# Altium schematic symbol library MY_LIB_Connectors_IEC.SchLib: 136 symbols (part 2 of 3)
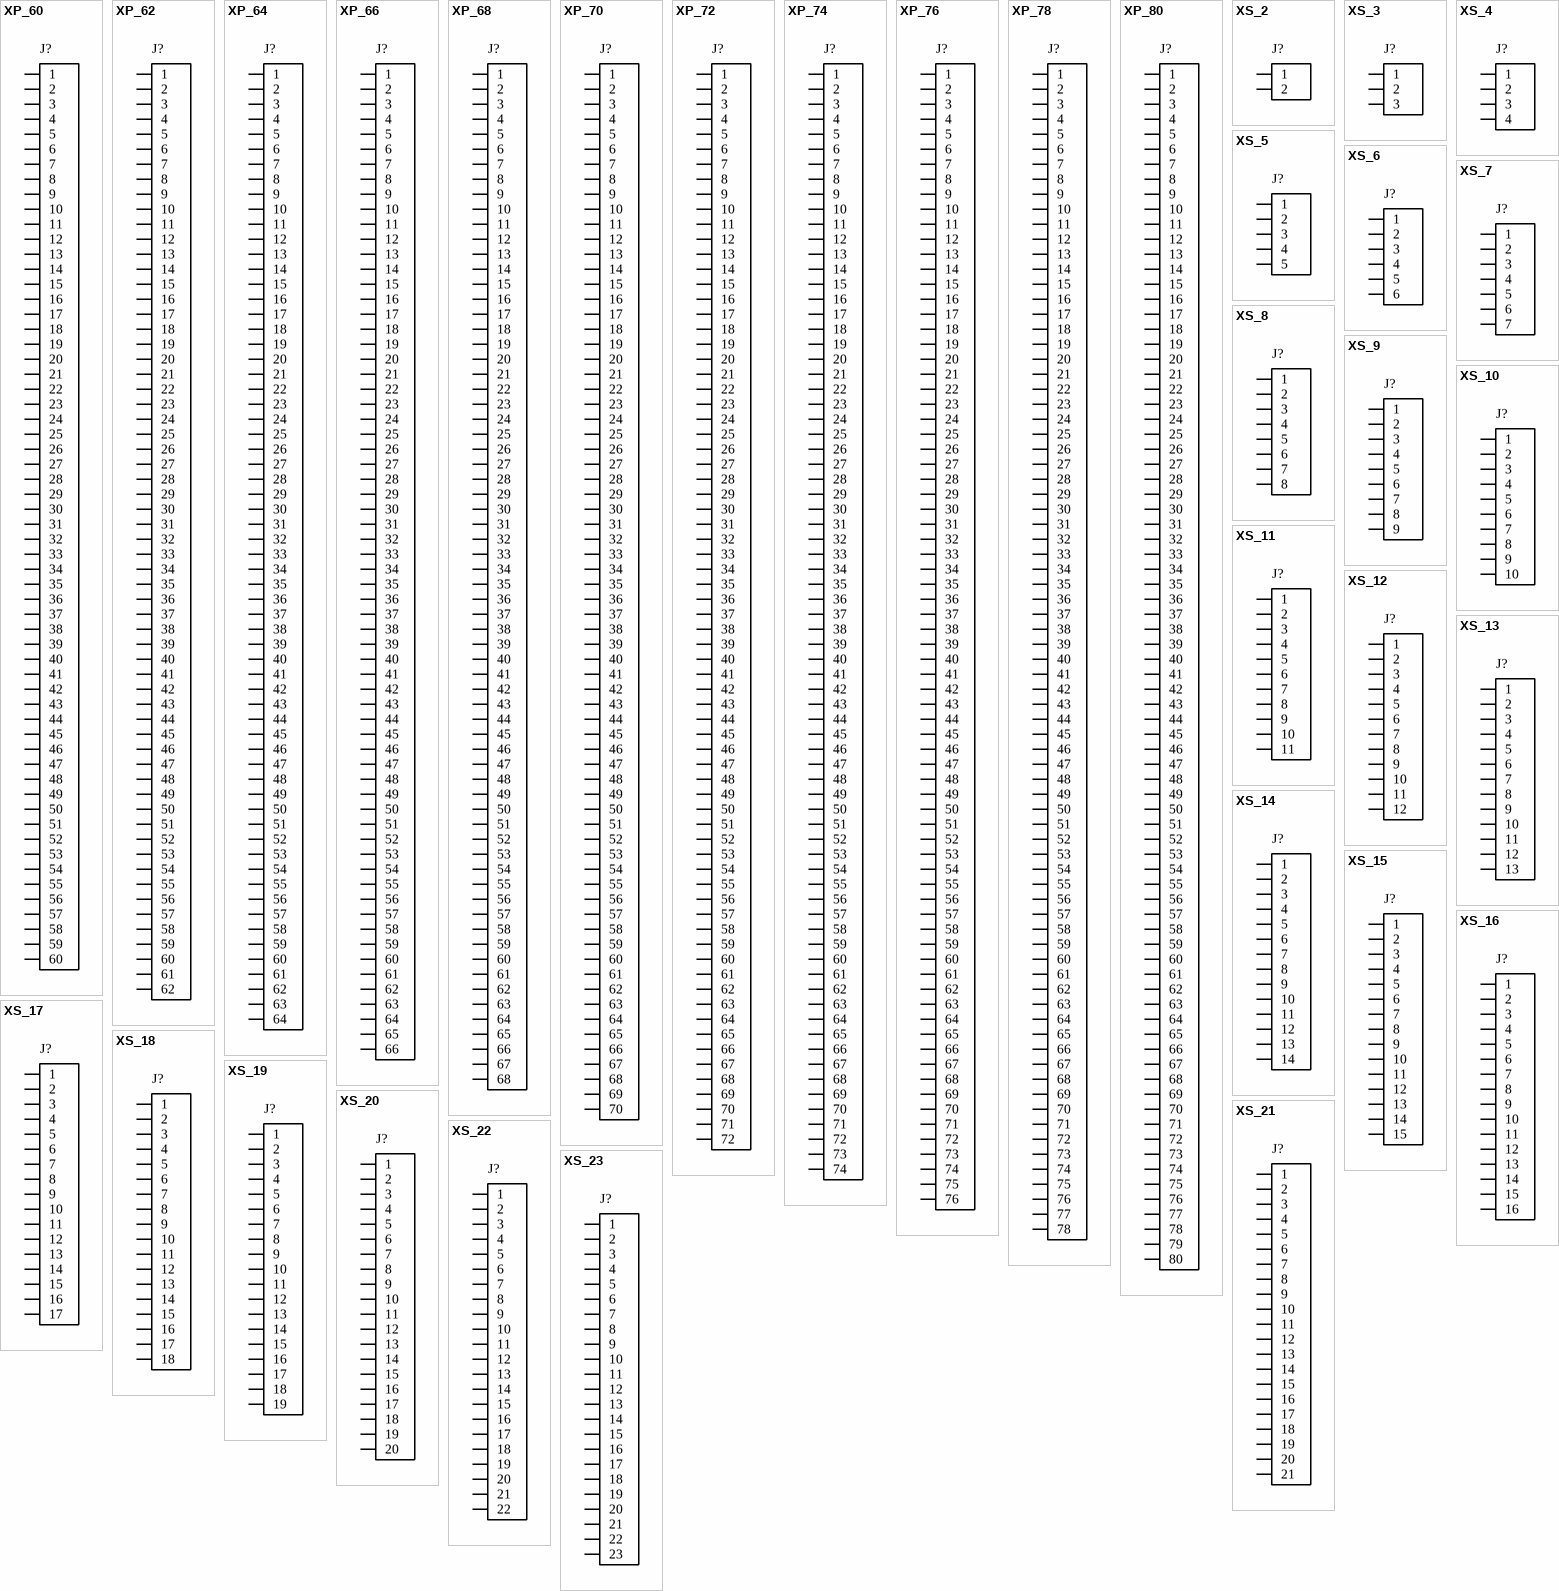
[diagram p5: symbols XP_60 to XS_23]

## XP_64
designator J?  (value not drawn)
Generic 64-contact connector; editable signal names; Pin64_Name: Name; Value: *; Pin63_Name: Name; Pin62_Name: Name; Pin61_Name: Name; Pin60_Name: Name; Pin59_Name: Name; Pin58_Name: Name; Pin57_Name: Name; Pin56_Name: Name; Pin55_Name: Name; Pin54_Name: Name; Pin53_Name: Name; Pin52_Name: Name; Pin51_Name: Name; Pin50_Name: Name; Pin49_Name: Name; Pin48_Name: Name; Pin47_Name: Name; Pin46_Name: Name; Pin45_Name: Name; Pin44_Name: Name; Pin43_Name: Name; Pin42_Name: Name; Pin41_Name: Name; Pin40_Name: Name; Pin39_Name: Name; Pin38_Name: Name; Pin37_Name: Name; Pin36_Name: Name; Pin35_Name: Name; Pin34_Name: Name; Pin33_Name: Name; Pin32_Name: Name; Pin31_Name: Name; Pin30_Name: Name; Pin29_Name: Name; Pin28_Name: Name; Pin27_Name: Name; Pin26_Name: Name; Pin25_Name: Name; Pin24_Name: Name; Pin23_Name: Name; Pin22_Name: Name; Pin21_Name: Name; Pin20_Name: Name; Pin19_Name: Name; Pin18_Name: Name; Pin17_Name: Name; Pin16_Name: Name; Pin15_Name: Name; Pin14_Name: Name; Pin13_Name: Name; Pin12_Name: Name; Pin11_Name: Name; Pin10_Name: Name; Pin9_Name: Name; Pin8_Name: Name; Pin7_Name: Name; Pin6_Name: Name; Pin5_Name: Name; Pin4_Name: Name; Pin3_Name: Name; Pin2_Name: Name; Pin1_Name: Name
pins: 1 Name, 2 Name, 3 Name, 4 Name, 5 Name, 6 Name, 7 Name, 8 Name, 9 Name, 10 Name, 11 Name, 12 Name, 13 Name, 14 Name, 15 Name, 16 Name, 17 Name, 18 Name, 19 Name, 20 Name, 21 Name, 22 Name, 23 Name, 24 Name, 25 Name, 26 Name, 27 Name, 28 Name, 29 Name, 30 Name, 31 Name, 32 Name, 33 Name, 34 Name, 35 Name, 36 Name, 37 Name, 38 Name, 39 Name, 40 Name, 41 Name, 42 Name, 43 Name, 44 Name, 45 Name, 46 Name, 47 Name, 48 Name, 49 Name, 50 Name, 51 Name, 52 Name, 53 Name, 54 Name, 55 Name, 56 Name, 57 Name, 58 Name, 59 Name, 60 Name, 61 Name, 62 Name, 63 Name, 64 Name

## XP_66
designator J?  (value not drawn)
Generic 66-contact connector; editable signal names; Pin66_Name: Name; Value: *; Pin65_Name: Name; Pin64_Name: Name; Pin63_Name: Name; Pin62_Name: Name; Pin61_Name: Name; Pin60_Name: Name; Pin59_Name: Name; Pin58_Name: Name; Pin57_Name: Name; Pin56_Name: Name; Pin55_Name: Name; Pin54_Name: Name; Pin53_Name: Name; Pin52_Name: Name; Pin51_Name: Name; Pin50_Name: Name; Pin49_Name: Name; Pin48_Name: Name; Pin47_Name: Name; Pin46_Name: Name; Pin45_Name: Name; Pin44_Name: Name; Pin43_Name: Name; Pin42_Name: Name; Pin41_Name: Name; Pin40_Name: Name; Pin39_Name: Name; Pin38_Name: Name; Pin37_Name: Name; Pin36_Name: Name; Pin35_Name: Name; Pin34_Name: Name; Pin33_Name: Name; Pin32_Name: Name; Pin31_Name: Name; Pin30_Name: Name; Pin29_Name: Name; Pin28_Name: Name; Pin27_Name: Name; Pin26_Name: Name; Pin25_Name: Name; Pin24_Name: Name; Pin23_Name: Name; Pin22_Name: Name; Pin21_Name: Name; Pin20_Name: Name; Pin19_Name: Name; Pin18_Name: Name; Pin17_Name: Name; Pin16_Name: Name; Pin15_Name: Name; Pin14_Name: Name; Pin13_Name: Name; Pin12_Name: Name; Pin11_Name: Name; Pin10_Name: Name; Pin9_Name: Name; Pin8_Name: Name; Pin7_Name: Name; Pin6_Name: Name; Pin5_Name: Name; Pin4_Name: Name; Pin3_Name: Name; Pin2_Name: Name; Pin1_Name: Name
pins: 1 Name, 2 Name, 3 Name, 4 Name, 5 Name, 6 Name, 7 Name, 8 Name, 9 Name, 10 Name, 11 Name, 12 Name, 13 Name, 14 Name, 15 Name, 16 Name, 17 Name, 18 Name, 19 Name, 20 Name, 21 Name, 22 Name, 23 Name, 24 Name, 25 Name, 26 Name, 27 Name, 28 Name, 29 Name, 30 Name, 31 Name, 32 Name, 33 Name, 34 Name, 35 Name, 36 Name, 37 Name, 38 Name, 39 Name, 40 Name, 41 Name, 42 Name, 43 Name, 44 Name, 45 Name, 46 Name, 47 Name, 48 Name, 49 Name, 50 Name, 51 Name, 52 Name, 53 Name, 54 Name, 55 Name, 56 Name, 57 Name, 58 Name, 59 Name, 60 Name, 61 Name, 62 Name, 63 Name, 64 Name, 65 Name, 66 Name

## XP_68
designator J?  (value not drawn)
Generic 68-contact connector; editable signal names; Pin68_Name: Name; Value: *; Pin67_Name: Name; Pin66_Name: Name; Pin65_Name: Name; Pin64_Name: Name; Pin63_Name: Name; Pin62_Name: Name; Pin61_Name: Name; Pin60_Name: Name; Pin59_Name: Name; Pin58_Name: Name; Pin57_Name: Name; Pin56_Name: Name; Pin55_Name: Name; Pin54_Name: Name; Pin53_Name: Name; Pin52_Name: Name; Pin51_Name: Name; Pin50_Name: Name; Pin49_Name: Name; Pin48_Name: Name; Pin47_Name: Name; Pin46_Name: Name; Pin45_Name: Name; Pin44_Name: Name; Pin43_Name: Name; Pin42_Name: Name; Pin41_Name: Name; Pin40_Name: Name; Pin39_Name: Name; Pin38_Name: Name; Pin37_Name: Name; Pin36_Name: Name; Pin35_Name: Name; Pin34_Name: Name; Pin33_Name: Name; Pin32_Name: Name; Pin31_Name: Name; Pin30_Name: Name; Pin29_Name: Name; Pin28_Name: Name; Pin27_Name: Name; Pin26_Name: Name; Pin25_Name: Name; Pin24_Name: Name; Pin23_Name: Name; Pin22_Name: Name; Pin21_Name: Name; Pin20_Name: Name; Pin19_Name: Name; Pin18_Name: Name; Pin17_Name: Name; Pin16_Name: Name; Pin15_Name: Name; Pin14_Name: Name; Pin13_Name: Name; Pin12_Name: Name; Pin11_Name: Name; Pin10_Name: Name; Pin9_Name: Name; Pin8_Name: Name; Pin7_Name: Name; Pin6_Name: Name; Pin5_Name: Name; Pin4_Name: Name; Pin3_Name: Name; Pin2_Name: Name; Pin1_Name: Name
pins: 1 Name, 2 Name, 3 Name, 4 Name, 5 Name, 6 Name, 7 Name, 8 Name, 9 Name, 10 Name, 11 Name, 12 Name, 13 Name, 14 Name, 15 Name, 16 Name, 17 Name, 18 Name, 19 Name, 20 Name, 21 Name, 22 Name, 23 Name, 24 Name, 25 Name, 26 Name, 27 Name, 28 Name, 29 Name, 30 Name, 31 Name, 32 Name, 33 Name, 34 Name, 35 Name, 36 Name, 37 Name, 38 Name, 39 Name, 40 Name, 41 Name, 42 Name, 43 Name, 44 Name, 45 Name, 46 Name, 47 Name, 48 Name, 49 Name, 50 Name, 51 Name, 52 Name, 53 Name, 54 Name, 55 Name, 56 Name, 57 Name, 58 Name, 59 Name, 60 Name, 61 Name, 62 Name, 63 Name, 64 Name, 65 Name, 66 Name, 67 Name, 68 Name

## XP_70
designator J?  (value not drawn)
Generic 70-contact connector; editable signal names; Pin70_Name: Name; Value: *; Pin69_Name: Name; Pin68_Name: Name; Pin67_Name: Name; Pin66_Name: Name; Pin65_Name: Name; Pin64_Name: Name; Pin63_Name: Name; Pin62_Name: Name; Pin61_Name: Name; Pin60_Name: Name; Pin59_Name: Name; Pin58_Name: Name; Pin57_Name: Name; Pin56_Name: Name; Pin55_Name: Name; Pin54_Name: Name; Pin53_Name: Name; Pin52_Name: Name; Pin51_Name: Name; Pin50_Name: Name; Pin49_Name: Name; Pin48_Name: Name; Pin47_Name: Name; Pin46_Name: Name; Pin45_Name: Name; Pin44_Name: Name; Pin43_Name: Name; Pin42_Name: Name; Pin41_Name: Name; Pin40_Name: Name; Pin39_Name: Name; Pin38_Name: Name; Pin37_Name: Name; Pin36_Name: Name; Pin35_Name: Name; Pin34_Name: Name; Pin33_Name: Name; Pin32_Name: Name; Pin31_Name: Name; Pin30_Name: Name; Pin29_Name: Name; Pin28_Name: Name; Pin27_Name: Name; Pin26_Name: Name; Pin25_Name: Name; Pin24_Name: Name; Pin23_Name: Name; Pin22_Name: Name; Pin21_Name: Name; Pin20_Name: Name; Pin19_Name: Name; Pin18_Name: Name; Pin17_Name: Name; Pin16_Name: Name; Pin15_Name: Name; Pin14_Name: Name; Pin13_Name: Name; Pin12_Name: Name; Pin11_Name: Name; Pin10_Name: Name; Pin9_Name: Name; Pin8_Name: Name; Pin7_Name: Name; Pin6_Name: Name; Pin5_Name: Name; Pin4_Name: Name; Pin3_Name: Name; Pin2_Name: Name; Pin1_Name: Name
pins: 1 Name, 2 Name, 3 Name, 4 Name, 5 Name, 6 Name, 7 Name, 8 Name, 9 Name, 10 Name, 11 Name, 12 Name, 13 Name, 14 Name, 15 Name, 16 Name, 17 Name, 18 Name, 19 Name, 20 Name, 21 Name, 22 Name, 23 Name, 24 Name, 25 Name, 26 Name, 27 Name, 28 Name, 29 Name, 30 Name, 31 Name, 32 Name, 33 Name, 34 Name, 35 Name, 36 Name, 37 Name, 38 Name, 39 Name, 40 Name, 41 Name, 42 Name, 43 Name, 44 Name, 45 Name, 46 Name, 47 Name, 48 Name, 49 Name, 50 Name, 51 Name, 52 Name, 53 Name, 54 Name, 55 Name, 56 Name, 57 Name, 58 Name, 59 Name, 60 Name, 61 Name, 62 Name, 63 Name, 64 Name, 65 Name, 66 Name, 67 Name, 68 Name, 69 Name, 70 Name

## XP_72
designator J?  (value not drawn)
Generic 72-contact connector; editable signal names; Pin72_Name: Name; Value: *; Pin71_Name: Name; Pin70_Name: Name; Pin69_Name: Name; Pin68_Name: Name; Pin67_Name: Name; Pin66_Name: Name; Pin65_Name: Name; Pin64_Name: Name; Pin63_Name: Name; Pin62_Name: Name; Pin61_Name: Name; Pin60_Name: Name; Pin59_Name: Name; Pin58_Name: Name; Pin57_Name: Name; Pin56_Name: Name; Pin55_Name: Name; Pin54_Name: Name; Pin53_Name: Name; Pin52_Name: Name; Pin51_Name: Name; Pin50_Name: Name; Pin49_Name: Name; Pin48_Name: Name; Pin47_Name: Name; Pin46_Name: Name; Pin45_Name: Name; Pin44_Name: Name; Pin43_Name: Name; Pin42_Name: Name; Pin41_Name: Name; Pin40_Name: Name; Pin39_Name: Name; Pin38_Name: Name; Pin37_Name: Name; Pin36_Name: Name; Pin35_Name: Name; Pin34_Name: Name; Pin33_Name: Name; Pin32_Name: Name; Pin31_Name: Name; Pin30_Name: Name; Pin29_Name: Name; Pin28_Name: Name; Pin27_Name: Name; Pin26_Name: Name; Pin25_Name: Name; Pin24_Name: Name; Pin23_Name: Name; Pin22_Name: Name; Pin21_Name: Name; Pin20_Name: Name; Pin19_Name: Name; Pin18_Name: Name; Pin17_Name: Name; Pin16_Name: Name; Pin15_Name: Name; Pin14_Name: Name; Pin13_Name: Name; Pin12_Name: Name; Pin11_Name: Name; Pin10_Name: Name; Pin9_Name: Name; Pin8_Name: Name; Pin7_Name: Name; Pin6_Name: Name; Pin5_Name: Name; Pin4_Name: Name; Pin3_Name: Name; Pin2_Name: Name; Pin1_Name: Name
pins: 1 Name, 2 Name, 3 Name, 4 Name, 5 Name, 6 Name, 7 Name, 8 Name, 9 Name, 10 Name, 11 Name, 12 Name, 13 Name, 14 Name, 15 Name, 16 Name, 17 Name, 18 Name, 19 Name, 20 Name, 21 Name, 22 Name, 23 Name, 24 Name, 25 Name, 26 Name, 27 Name, 28 Name, 29 Name, 30 Name, 31 Name, 32 Name, 33 Name, 34 Name, 35 Name, 36 Name, 37 Name, 38 Name, 39 Name, 40 Name, 41 Name, 42 Name, 43 Name, 44 Name, 45 Name, 46 Name, 47 Name, 48 Name, 49 Name, 50 Name, 51 Name, 52 Name, 53 Name, 54 Name, 55 Name, 56 Name, 57 Name, 58 Name, 59 Name, 60 Name, 61 Name, 62 Name, 63 Name, 64 Name, 65 Name, 66 Name, 67 Name, 68 Name, 69 Name, 70 Name, 71 Name, 72 Name

## XP_74
designator J?  (value not drawn)
Generic 74-contact connector; editable signal names; Pin74_Name: Name; Value: *; Pin73_Name: Name; Pin72_Name: Name; Pin71_Name: Name; Pin70_Name: Name; Pin69_Name: Name; Pin68_Name: Name; Pin67_Name: Name; Pin66_Name: Name; Pin65_Name: Name; Pin64_Name: Name; Pin63_Name: Name; Pin62_Name: Name; Pin61_Name: Name; Pin60_Name: Name; Pin59_Name: Name; Pin58_Name: Name; Pin57_Name: Name; Pin56_Name: Name; Pin55_Name: Name; Pin54_Name: Name; Pin53_Name: Name; Pin52_Name: Name; Pin51_Name: Name; Pin50_Name: Name; Pin49_Name: Name; Pin48_Name: Name; Pin47_Name: Name; Pin46_Name: Name; Pin45_Name: Name; Pin44_Name: Name; Pin43_Name: Name; Pin42_Name: Name; Pin41_Name: Name; Pin40_Name: Name; Pin39_Name: Name; Pin38_Name: Name; Pin37_Name: Name; Pin36_Name: Name; Pin35_Name: Name; Pin34_Name: Name; Pin33_Name: Name; Pin32_Name: Name; Pin31_Name: Name; Pin30_Name: Name; Pin29_Name: Name; Pin28_Name: Name; Pin27_Name: Name; Pin26_Name: Name; Pin25_Name: Name; Pin24_Name: Name; Pin23_Name: Name; Pin22_Name: Name; Pin21_Name: Name; Pin20_Name: Name; Pin19_Name: Name; Pin18_Name: Name; Pin17_Name: Name; Pin16_Name: Name; Pin15_Name: Name; Pin14_Name: Name; Pin13_Name: Name; Pin12_Name: Name; Pin11_Name: Name; Pin10_Name: Name; Pin9_Name: Name; Pin8_Name: Name; Pin7_Name: Name; Pin6_Name: Name; Pin5_Name: Name; Pin4_Name: Name; Pin3_Name: Name; Pin2_Name: Name; Pin1_Name: Name
pins: 1 Name, 2 Name, 3 Name, 4 Name, 5 Name, 6 Name, 7 Name, 8 Name, 9 Name, 10 Name, 11 Name, 12 Name, 13 Name, 14 Name, 15 Name, 16 Name, 17 Name, 18 Name, 19 Name, 20 Name, 21 Name, 22 Name, 23 Name, 24 Name, 25 Name, 26 Name, 27 Name, 28 Name, 29 Name, 30 Name, 31 Name, 32 Name, 33 Name, 34 Name, 35 Name, 36 Name, 37 Name, 38 Name, 39 Name, 40 Name, 41 Name, 42 Name, 43 Name, 44 Name, 45 Name, 46 Name, 47 Name, 48 Name, 49 Name, 50 Name, 51 Name, 52 Name, 53 Name, 54 Name, 55 Name, 56 Name, 57 Name, 58 Name, 59 Name, 60 Name, 61 Name, 62 Name, 63 Name, 64 Name, 65 Name, 66 Name, 67 Name, 68 Name, 69 Name, 70 Name, 71 Name, 72 Name, 73 Name, 74 Name

## XP_76
designator J?  (value not drawn)
Generic 76-contact connector; editable signal names; Pin76_Name: Name; Value: *; Pin75_Name: Name; Pin74_Name: Name; Pin73_Name: Name; Pin72_Name: Name; Pin71_Name: Name; Pin70_Name: Name; Pin69_Name: Name; Pin68_Name: Name; Pin67_Name: Name; Pin66_Name: Name; Pin65_Name: Name; Pin64_Name: Name; Pin63_Name: Name; Pin62_Name: Name; Pin61_Name: Name; Pin60_Name: Name; Pin59_Name: Name; Pin58_Name: Name; Pin57_Name: Name; Pin56_Name: Name; Pin55_Name: Name; Pin54_Name: Name; Pin53_Name: Name; Pin52_Name: Name; Pin51_Name: Name; Pin50_Name: Name; Pin49_Name: Name; Pin48_Name: Name; Pin47_Name: Name; Pin46_Name: Name; Pin45_Name: Name; Pin44_Name: Name; Pin43_Name: Name; Pin42_Name: Name; Pin41_Name: Name; Pin40_Name: Name; Pin39_Name: Name; Pin38_Name: Name; Pin37_Name: Name; Pin36_Name: Name; Pin35_Name: Name; Pin34_Name: Name; Pin33_Name: Name; Pin32_Name: Name; Pin31_Name: Name; Pin30_Name: Name; Pin29_Name: Name; Pin28_Name: Name; Pin27_Name: Name; Pin26_Name: Name; Pin25_Name: Name; Pin24_Name: Name; Pin23_Name: Name; Pin22_Name: Name; Pin21_Name: Name; Pin20_Name: Name; Pin19_Name: Name; Pin18_Name: Name; Pin17_Name: Name; Pin16_Name: Name; Pin15_Name: Name; Pin14_Name: Name; Pin13_Name: Name; Pin12_Name: Name; Pin11_Name: Name; Pin10_Name: Name; Pin9_Name: Name; Pin8_Name: Name; Pin7_Name: Name; Pin6_Name: Name; Pin5_Name: Name; Pin4_Name: Name; Pin3_Name: Name; Pin2_Name: Name; Pin1_Name: Name
pins: 1 Name, 2 Name, 3 Name, 4 Name, 5 Name, 6 Name, 7 Name, 8 Name, 9 Name, 10 Name, 11 Name, 12 Name, 13 Name, 14 Name, 15 Name, 16 Name, 17 Name, 18 Name, 19 Name, 20 Name, 21 Name, 22 Name, 23 Name, 24 Name, 25 Name, 26 Name, 27 Name, 28 Name, 29 Name, 30 Name, 31 Name, 32 Name, 33 Name, 34 Name, 35 Name, 36 Name, 37 Name, 38 Name, 39 Name, 40 Name, 41 Name, 42 Name, 43 Name, 44 Name, 45 Name, 46 Name, 47 Name, 48 Name, 49 Name, 50 Name, 51 Name, 52 Name, 53 Name, 54 Name, 55 Name, 56 Name, 57 Name, 58 Name, 59 Name, 60 Name, 61 Name, 62 Name, 63 Name, 64 Name, 65 Name, 66 Name, 67 Name, 68 Name, 69 Name, 70 Name, 71 Name, 72 Name, 73 Name, 74 Name, 75 Name, 76 Name

## XP_78
designator J?  (value not drawn)
Generic 78-contact connector; editable signal names; Pin78_Name: Name; Value: *; Pin77_Name: Name; Pin76_Name: Name; Pin75_Name: Name; Pin74_Name: Name; Pin73_Name: Name; Pin72_Name: Name; Pin71_Name: Name; Pin70_Name: Name; Pin69_Name: Name; Pin68_Name: Name; Pin67_Name: Name; Pin66_Name: Name; Pin65_Name: Name; Pin64_Name: Name; Pin63_Name: Name; Pin62_Name: Name; Pin61_Name: Name; Pin60_Name: Name; Pin59_Name: Name; Pin58_Name: Name; Pin57_Name: Name; Pin56_Name: Name; Pin55_Name: Name; Pin54_Name: Name; Pin53_Name: Name; Pin52_Name: Name; Pin51_Name: Name; Pin50_Name: Name; Pin49_Name: Name; Pin48_Name: Name; Pin47_Name: Name; Pin46_Name: Name; Pin45_Name: Name; Pin44_Name: Name; Pin43_Name: Name; Pin42_Name: Name; Pin41_Name: Name; Pin40_Name: Name; Pin39_Name: Name; Pin38_Name: Name; Pin37_Name: Name; Pin36_Name: Name; Pin35_Name: Name; Pin34_Name: Name; Pin33_Name: Name; Pin32_Name: Name; Pin31_Name: Name; Pin30_Name: Name; Pin29_Name: Name; Pin28_Name: Name; Pin27_Name: Name; Pin26_Name: Name; Pin25_Name: Name; Pin24_Name: Name; Pin23_Name: Name; Pin22_Name: Name; Pin21_Name: Name; Pin20_Name: Name; Pin19_Name: Name; Pin18_Name: Name; Pin17_Name: Name; Pin16_Name: Name; Pin15_Name: Name; Pin14_Name: Name; Pin13_Name: Name; Pin12_Name: Name; Pin11_Name: Name; Pin10_Name: Name; Pin9_Name: Name; Pin8_Name: Name; Pin7_Name: Name; Pin6_Name: Name; Pin5_Name: Name; Pin4_Name: Name; Pin3_Name: Name; Pin2_Name: Name; Pin1_Name: Name
pins: 1 Name, 2 Name, 3 Name, 4 Name, 5 Name, 6 Name, 7 Name, 8 Name, 9 Name, 10 Name, 11 Name, 12 Name, 13 Name, 14 Name, 15 Name, 16 Name, 17 Name, 18 Name, 19 Name, 20 Name, 21 Name, 22 Name, 23 Name, 24 Name, 25 Name, 26 Name, 27 Name, 28 Name, 29 Name, 30 Name, 31 Name, 32 Name, 33 Name, 34 Name, 35 Name, 36 Name, 37 Name, 38 Name, 39 Name, 40 Name, 41 Name, 42 Name, 43 Name, 44 Name, 45 Name, 46 Name, 47 Name, 48 Name, 49 Name, 50 Name, 51 Name, 52 Name, 53 Name, 54 Name, 55 Name, 56 Name, 57 Name, 58 Name, 59 Name, 60 Name, 61 Name, 62 Name, 63 Name, 64 Name, 65 Name, 66 Name, 67 Name, 68 Name, 69 Name, 70 Name, 71 Name, 72 Name, 73 Name, 74 Name, 75 Name, 76 Name, 77 Name, 78 Name

## XP_80
designator J?  (value not drawn)
Generic 80-contact connector; editable signal names; Pin80_Name: Name; Value: *; Pin79_Name: Name; Pin78_Name: Name; Pin77_Name: Name; Pin76_Name: Name; Pin75_Name: Name; Pin74_Name: Name; Pin73_Name: Name; Pin72_Name: Name; Pin71_Name: Name; Pin70_Name: Name; Pin69_Name: Name; Pin68_Name: Name; Pin67_Name: Name; Pin66_Name: Name; Pin65_Name: Name; Pin64_Name: Name; Pin63_Name: Name; Pin62_Name: Name; Pin61_Name: Name; Pin60_Name: Name; Pin59_Name: Name; Pin58_Name: Name; Pin57_Name: Name; Pin56_Name: Name; Pin55_Name: Name; Pin54_Name: Name; Pin53_Name: Name; Pin52_Name: Name; Pin51_Name: Name; Pin50_Name: Name; Pin49_Name: Name; Pin48_Name: Name; Pin47_Name: Name; Pin46_Name: Name; Pin45_Name: Name; Pin44_Name: Name; Pin43_Name: Name; Pin42_Name: Name; Pin41_Name: Name; Pin40_Name: Name; Pin39_Name: Name; Pin38_Name: Name; Pin37_Name: Name; Pin36_Name: Name; Pin35_Name: Name; Pin34_Name: Name; Pin33_Name: Name; Pin32_Name: Name; Pin31_Name: Name; Pin30_Name: Name; Pin29_Name: Name; Pin28_Name: Name; Pin27_Name: Name; Pin26_Name: Name; Pin25_Name: Name; Pin24_Name: Name; Pin23_Name: Name; Pin22_Name: Name; Pin21_Name: Name; Pin20_Name: Name; Pin19_Name: Name; Pin18_Name: Name; Pin17_Name: Name; Pin16_Name: Name; Pin15_Name: Name; Pin14_Name: Name; Pin13_Name: Name; Pin12_Name: Name; Pin11_Name: Name; Pin10_Name: Name; Pin9_Name: Name; Pin8_Name: Name; Pin7_Name: Name; Pin6_Name: Name; Pin5_Name: Name; Pin4_Name: Name; Pin3_Name: Name; Pin2_Name: Name; Pin1_Name: Name
pins: 1 Name, 2 Name, 3 Name, 4 Name, 5 Name, 6 Name, 7 Name, 8 Name, 9 Name, 10 Name, 11 Name, 12 Name, 13 Name, 14 Name, 15 Name, 16 Name, 17 Name, 18 Name, 19 Name, 20 Name, 21 Name, 22 Name, 23 Name, 24 Name, 25 Name, 26 Name, 27 Name, 28 Name, 29 Name, 30 Name, 31 Name, 32 Name, 33 Name, 34 Name, 35 Name, 36 Name, 37 Name, 38 Name, 39 Name, 40 Name, 41 Name, 42 Name, 43 Name, 44 Name, 45 Name, 46 Name, 47 Name, 48 Name, 49 Name, 50 Name, 51 Name, 52 Name, 53 Name, 54 Name, 55 Name, 56 Name, 57 Name, 58 Name, 59 Name, 60 Name, 61 Name, 62 Name, 63 Name, 64 Name, 65 Name, 66 Name, 67 Name, 68 Name, 69 Name, 70 Name, 71 Name, 72 Name, 73 Name, 74 Name, 75 Name, 76 Name, 77 Name, 78 Name, 79 Name, 80 Name

## XS_2
designator J?  (value not drawn)
Generic 2-contact connector; editable signal names; Pin2_Name: Name; Value: *; Pin1_Name: Name
pins: 1 Name, 2 Name

## XS_3
designator J?  (value not drawn)
Generic 3-contact connector; editable signal names; Pin3_Name: Name; Value: *; Pin2_Name: Name; Pin1_Name: Name
pins: 1 Name, 2 Name, 3 Name

## XS_4
designator J?  (value not drawn)
Generic 4-contact connector; editable signal names; Pin4_Name: Name; Value: *; Pin3_Name: Name; Pin2_Name: Name; Pin1_Name: Name
pins: 1 Name, 2 Name, 3 Name, 4 Name

## XS_5
designator J?  (value not drawn)
Generic 5-contact connector; editable signal names; Pin5_Name: Name; Value: *; Pin4_Name: Name; Pin3_Name: Name; Pin2_Name: Name; Pin1_Name: Name
pins: 1 Name, 2 Name, 3 Name, 4 Name, 5 Name

## XS_6
designator J?  (value not drawn)
Generic 6-contact connector; editable signal names; Pin6_Name: Name; Value: *; Pin5_Name: Name; Pin4_Name: Name; Pin3_Name: Name; Pin2_Name: Name; Pin1_Name: Name
pins: 1 Name, 2 Name, 3 Name, 4 Name, 5 Name, 6 Name

## XS_7
designator J?  (value not drawn)
Generic 7-contact connector; editable signal names; Pin7_Name: Name; Value: *; Pin6_Name: Name; Pin5_Name: Name; Pin4_Name: Name; Pin3_Name: Name; Pin2_Name: Name; Pin1_Name: Name
pins: 1 Name, 2 Name, 3 Name, 4 Name, 5 Name, 6 Name, 7 Name

## XS_8
designator J?  (value not drawn)
Generic 8-contact connector; editable signal names; Pin8_Name: Name; Value: *; Pin7_Name: Name; Pin6_Name: Name; Pin5_Name: Name; Pin4_Name: Name; Pin3_Name: Name; Pin2_Name: Name; Pin1_Name: Name
pins: 1 Name, 2 Name, 3 Name, 4 Name, 5 Name, 6 Name, 7 Name, 8 Name

## XS_9
designator J?  (value not drawn)
Generic 9-contact connector; editable signal names; Pin9_Name: Name; Value: *; Pin8_Name: Name; Pin7_Name: Name; Pin6_Name: Name; Pin5_Name: Name; Pin4_Name: Name; Pin3_Name: Name; Pin2_Name: Name; Pin1_Name: Name
pins: 1 Name, 2 Name, 3 Name, 4 Name, 5 Name, 6 Name, 7 Name, 8 Name, 9 Name

## XS_10
designator J?  (value not drawn)
Generic 10-contact connector; editable signal names; Pin10_Name: Name; Value: *; Pin9_Name: Name; Pin8_Name: Name; Pin7_Name: Name; Pin6_Name: Name; Pin5_Name: Name; Pin4_Name: Name; Pin3_Name: Name; Pin2_Name: Name; Pin1_Name: Name
pins: 1 Name, 2 Name, 3 Name, 4 Name, 5 Name, 6 Name, 7 Name, 8 Name, 9 Name, 10 Name

## XS_11
designator J?  (value not drawn)
Generic 11-contact connector; editable signal names; Pin11_Name: Name; Value: *; Pin10_Name: Name; Pin9_Name: Name; Pin8_Name: Name; Pin7_Name: Name; Pin6_Name: Name; Pin5_Name: Name; Pin4_Name: Name; Pin3_Name: Name; Pin2_Name: Name; Pin1_Name: Name
pins: 1 Name, 2 Name, 3 Name, 4 Name, 5 Name, 6 Name, 7 Name, 8 Name, 9 Name, 10 Name, 11 Name

## XS_12
designator J?  (value not drawn)
Generic 12-contact connector; editable signal names; Pin12_Name: Name; Value: *; Pin11_Name: Name; Pin10_Name: Name; Pin9_Name: Name; Pin8_Name: Name; Pin7_Name: Name; Pin6_Name: Name; Pin5_Name: Name; Pin4_Name: Name; Pin3_Name: Name; Pin2_Name: Name; Pin1_Name: Name
pins: 1 Name, 2 Name, 3 Name, 4 Name, 5 Name, 6 Name, 7 Name, 8 Name, 9 Name, 10 Name, 11 Name, 12 Name

## XS_13
designator J?  (value not drawn)
Generic 13-contact connector; editable signal names; Pin13_Name: Name; Value: *; Pin12_Name: Name; Pin11_Name: Name; Pin10_Name: Name; Pin9_Name: Name; Pin8_Name: Name; Pin7_Name: Name; Pin6_Name: Name; Pin5_Name: Name; Pin4_Name: Name; Pin3_Name: Name; Pin2_Name: Name; Pin1_Name: Name
pins: 1 Name, 2 Name, 3 Name, 4 Name, 5 Name, 6 Name, 7 Name, 8 Name, 9 Name, 10 Name, 11 Name, 12 Name, 13 Name

## XS_14
designator J?  (value not drawn)
Generic 14-contact connector; editable signal names; Pin14_Name: Name; Value: *; Pin13_Name: Name; Pin12_Name: Name; Pin11_Name: Name; Pin10_Name: Name; Pin9_Name: Name; Pin8_Name: Name; Pin7_Name: Name; Pin6_Name: Name; Pin5_Name: Name; Pin4_Name: Name; Pin3_Name: Name; Pin2_Name: Name; Pin1_Name: Name
pins: 1 Name, 2 Name, 3 Name, 4 Name, 5 Name, 6 Name, 7 Name, 8 Name, 9 Name, 10 Name, 11 Name, 12 Name, 13 Name, 14 Name

## XS_15
designator J?  (value not drawn)
Generic 15-contact connector; editable signal names; Pin15_Name: Name; Value: *; Pin14_Name: Name; Pin13_Name: Name; Pin12_Name: Name; Pin11_Name: Name; Pin10_Name: Name; Pin9_Name: Name; Pin8_Name: Name; Pin7_Name: Name; Pin6_Name: Name; Pin5_Name: Name; Pin4_Name: Name; Pin3_Name: Name; Pin2_Name: Name; Pin1_Name: Name
pins: 1 Name, 2 Name, 3 Name, 4 Name, 5 Name, 6 Name, 7 Name, 8 Name, 9 Name, 10 Name, 11 Name, 12 Name, 13 Name, 14 Name, 15 Name

## XS_16
designator J?  (value not drawn)
Generic 16-contact connector; editable signal names; Pin16_Name: Name; Value: *; Pin15_Name: Name; Pin14_Name: Name; Pin13_Name: Name; Pin12_Name: Name; Pin11_Name: Name; Pin10_Name: Name; Pin9_Name: Name; Pin8_Name: Name; Pin7_Name: Name; Pin6_Name: Name; Pin5_Name: Name; Pin4_Name: Name; Pin3_Name: Name; Pin2_Name: Name; Pin1_Name: Name
pins: 1 Name, 2 Name, 3 Name, 4 Name, 5 Name, 6 Name, 7 Name, 8 Name, 9 Name, 10 Name, 11 Name, 12 Name, 13 Name, 14 Name, 15 Name, 16 Name

## XS_17
designator J?  (value not drawn)
Generic 17-contact connector; editable signal names; Pin17_Name: Name; Value: *; Pin16_Name: Name; Pin15_Name: Name; Pin14_Name: Name; Pin13_Name: Name; Pin12_Name: Name; Pin11_Name: Name; Pin10_Name: Name; Pin9_Name: Name; Pin8_Name: Name; Pin7_Name: Name; Pin6_Name: Name; Pin5_Name: Name; Pin4_Name: Name; Pin3_Name: Name; Pin2_Name: Name; Pin1_Name: Name
pins: 1 Name, 2 Name, 3 Name, 4 Name, 5 Name, 6 Name, 7 Name, 8 Name, 9 Name, 10 Name, 11 Name, 12 Name, 13 Name, 14 Name, 15 Name, 16 Name, 17 Name

## XS_18
designator J?  (value not drawn)
Generic 18-contact connector; editable signal names; Pin18_Name: Name; Value: *; Pin17_Name: Name; Pin16_Name: Name; Pin15_Name: Name; Pin14_Name: Name; Pin13_Name: Name; Pin12_Name: Name; Pin11_Name: Name; Pin10_Name: Name; Pin9_Name: Name; Pin8_Name: Name; Pin7_Name: Name; Pin6_Name: Name; Pin5_Name: Name; Pin4_Name: Name; Pin3_Name: Name; Pin2_Name: Name; Pin1_Name: Name
pins: 1 Name, 2 Name, 3 Name, 4 Name, 5 Name, 6 Name, 7 Name, 8 Name, 9 Name, 10 Name, 11 Name, 12 Name, 13 Name, 14 Name, 15 Name, 16 Name, 17 Name, 18 Name

## XS_19
designator J?  (value not drawn)
Generic 19-contact connector; editable signal names; Pin19_Name: Name; Value: *; Pin18_Name: Name; Pin17_Name: Name; Pin16_Name: Name; Pin15_Name: Name; Pin14_Name: Name; Pin13_Name: Name; Pin12_Name: Name; Pin11_Name: Name; Pin10_Name: Name; Pin9_Name: Name; Pin8_Name: Name; Pin7_Name: Name; Pin6_Name: Name; Pin5_Name: Name; Pin4_Name: Name; Pin3_Name: Name; Pin2_Name: Name; Pin1_Name: Name
pins: 1 Name, 2 Name, 3 Name, 4 Name, 5 Name, 6 Name, 7 Name, 8 Name, 9 Name, 10 Name, 11 Name, 12 Name, 13 Name, 14 Name, 15 Name, 16 Name, 17 Name, 18 Name, 19 Name

## XS_20
designator J?  (value not drawn)
Generic 20-contact connector; editable signal names; Pin20_Name: Name; Value: *; Pin19_Name: Name; Pin18_Name: Name; Pin17_Name: Name; Pin16_Name: Name; Pin15_Name: Name; Pin14_Name: Name; Pin13_Name: Name; Pin12_Name: Name; Pin11_Name: Name; Pin10_Name: Name; Pin9_Name: Name; Pin8_Name: Name; Pin7_Name: Name; Pin6_Name: Name; Pin5_Name: Name; Pin4_Name: Name; Pin3_Name: Name; Pin2_Name: Name; Pin1_Name: Name
pins: 1 Name, 2 Name, 3 Name, 4 Name, 5 Name, 6 Name, 7 Name, 8 Name, 9 Name, 10 Name, 11 Name, 12 Name, 13 Name, 14 Name, 15 Name, 16 Name, 17 Name, 18 Name, 19 Name, 20 Name

## XS_21
designator J?  (value not drawn)
Generic 21-contact connector; editable signal names; Pin21_Name: Name; Value: *; Pin20_Name: Name; Pin19_Name: Name; Pin18_Name: Name; Pin17_Name: Name; Pin16_Name: Name; Pin15_Name: Name; Pin14_Name: Name; Pin13_Name: Name; Pin12_Name: Name; Pin11_Name: Name; Pin10_Name: Name; Pin9_Name: Name; Pin8_Name: Name; Pin7_Name: Name; Pin6_Name: Name; Pin5_Name: Name; Pin4_Name: Name; Pin3_Name: Name; Pin2_Name: Name; Pin1_Name: Name
pins: 1 Name, 2 Name, 3 Name, 4 Name, 5 Name, 6 Name, 7 Name, 8 Name, 9 Name, 10 Name, 11 Name, 12 Name, 13 Name, 14 Name, 15 Name, 16 Name, 17 Name, 18 Name, 19 Name, 20 Name, 21 Name

## XS_22
designator J?  (value not drawn)
Generic 22-contact connector; editable signal names; Pin22_Name: Name; Value: *; Pin21_Name: Name; Pin20_Name: Name; Pin19_Name: Name; Pin18_Name: Name; Pin17_Name: Name; Pin16_Name: Name; Pin15_Name: Name; Pin14_Name: Name; Pin13_Name: Name; Pin12_Name: Name; Pin11_Name: Name; Pin10_Name: Name; Pin9_Name: Name; Pin8_Name: Name; Pin7_Name: Name; Pin6_Name: Name; Pin5_Name: Name; Pin4_Name: Name; Pin3_Name: Name; Pin2_Name: Name; Pin1_Name: Name
pins: 1 Name, 2 Name, 3 Name, 4 Name, 5 Name, 6 Name, 7 Name, 8 Name, 9 Name, 10 Name, 11 Name, 12 Name, 13 Name, 14 Name, 15 Name, 16 Name, 17 Name, 18 Name, 19 Name, 20 Name, 21 Name, 22 Name

## XS_23
designator J?  (value not drawn)
Generic 23-contact connector; editable signal names; Pin23_Name: Name; Value: *; Pin22_Name: Name; Pin21_Name: Name; Pin20_Name: Name; Pin19_Name: Name; Pin18_Name: Name; Pin17_Name: Name; Pin16_Name: Name; Pin15_Name: Name; Pin14_Name: Name; Pin13_Name: Name; Pin12_Name: Name; Pin11_Name: Name; Pin10_Name: Name; Pin9_Name: Name; Pin8_Name: Name; Pin7_Name: Name; Pin6_Name: Name; Pin5_Name: Name; Pin4_Name: Name; Pin3_Name: Name; Pin2_Name: Name; Pin1_Name: Name
pins: 1 Name, 2 Name, 3 Name, 4 Name, 5 Name, 6 Name, 7 Name, 8 Name, 9 Name, 10 Name, 11 Name, 12 Name, 13 Name, 14 Name, 15 Name, 16 Name, 17 Name, 18 Name, 19 Name, 20 Name, 21 Name, 22 Name, 23 Name

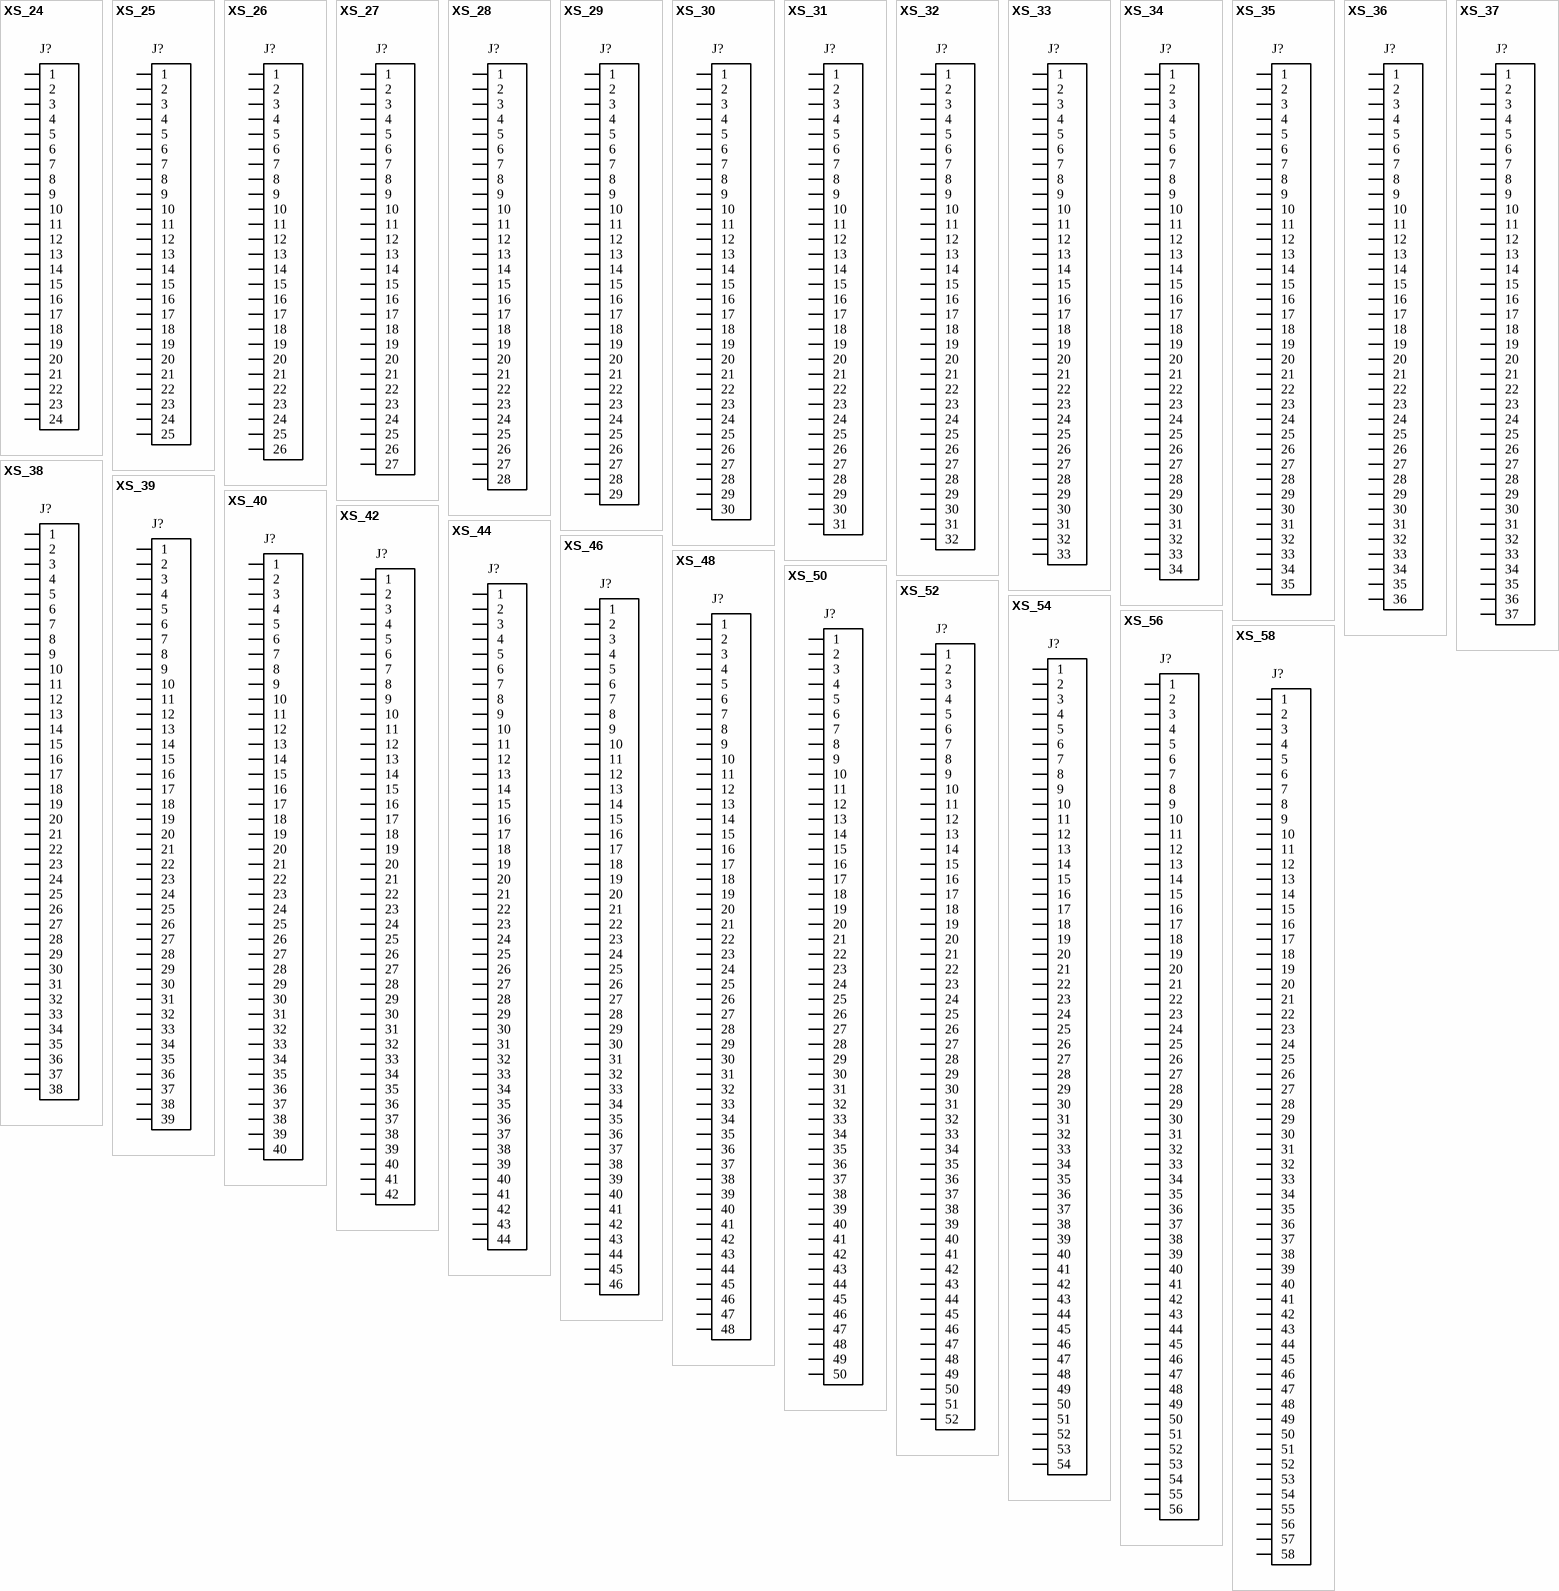
[diagram p3: symbols XS_24 to XS_58]

## XS_24
designator J?  (value not drawn)
Generic 24-contact connector; editable signal names; Pin24_Name: Name; Value: *; Pin23_Name: Name; Pin22_Name: Name; Pin21_Name: Name; Pin20_Name: Name; Pin19_Name: Name; Pin18_Name: Name; Pin17_Name: Name; Pin16_Name: Name; Pin15_Name: Name; Pin14_Name: Name; Pin13_Name: Name; Pin12_Name: Name; Pin11_Name: Name; Pin10_Name: Name; Pin9_Name: Name; Pin8_Name: Name; Pin7_Name: Name; Pin6_Name: Name; Pin5_Name: Name; Pin4_Name: Name; Pin3_Name: Name; Pin2_Name: Name; Pin1_Name: Name
pins: 1 Name, 2 Name, 3 Name, 4 Name, 5 Name, 6 Name, 7 Name, 8 Name, 9 Name, 10 Name, 11 Name, 12 Name, 13 Name, 14 Name, 15 Name, 16 Name, 17 Name, 18 Name, 19 Name, 20 Name, 21 Name, 22 Name, 23 Name, 24 Name

## XS_25
designator J?  (value not drawn)
Generic 25-contact connector; editable signal names; Pin25_Name: Name; Value: *; Pin24_Name: Name; Pin23_Name: Name; Pin22_Name: Name; Pin21_Name: Name; Pin20_Name: Name; Pin19_Name: Name; Pin18_Name: Name; Pin17_Name: Name; Pin16_Name: Name; Pin15_Name: Name; Pin14_Name: Name; Pin13_Name: Name; Pin12_Name: Name; Pin11_Name: Name; Pin10_Name: Name; Pin9_Name: Name; Pin8_Name: Name; Pin7_Name: Name; Pin6_Name: Name; Pin5_Name: Name; Pin4_Name: Name; Pin3_Name: Name; Pin2_Name: Name; Pin1_Name: Name
pins: 1 Name, 2 Name, 3 Name, 4 Name, 5 Name, 6 Name, 7 Name, 8 Name, 9 Name, 10 Name, 11 Name, 12 Name, 13 Name, 14 Name, 15 Name, 16 Name, 17 Name, 18 Name, 19 Name, 20 Name, 21 Name, 22 Name, 23 Name, 24 Name, 25 Name

## XS_26
designator J?  (value not drawn)
Generic 26-contact connector; editable signal names; Pin26_Name: Name; Value: *; Pin25_Name: Name; Pin24_Name: Name; Pin23_Name: Name; Pin22_Name: Name; Pin21_Name: Name; Pin20_Name: Name; Pin19_Name: Name; Pin18_Name: Name; Pin17_Name: Name; Pin16_Name: Name; Pin15_Name: Name; Pin14_Name: Name; Pin13_Name: Name; Pin12_Name: Name; Pin11_Name: Name; Pin10_Name: Name; Pin9_Name: Name; Pin8_Name: Name; Pin7_Name: Name; Pin6_Name: Name; Pin5_Name: Name; Pin4_Name: Name; Pin3_Name: Name; Pin2_Name: Name; Pin1_Name: Name
pins: 1 Name, 2 Name, 3 Name, 4 Name, 5 Name, 6 Name, 7 Name, 8 Name, 9 Name, 10 Name, 11 Name, 12 Name, 13 Name, 14 Name, 15 Name, 16 Name, 17 Name, 18 Name, 19 Name, 20 Name, 21 Name, 22 Name, 23 Name, 24 Name, 25 Name, 26 Name

## XS_27
designator J?  (value not drawn)
Generic 27-contact connector; editable signal names; Pin27_Name: Name; Value: *; Pin26_Name: Name; Pin25_Name: Name; Pin24_Name: Name; Pin23_Name: Name; Pin22_Name: Name; Pin21_Name: Name; Pin20_Name: Name; Pin19_Name: Name; Pin18_Name: Name; Pin17_Name: Name; Pin16_Name: Name; Pin15_Name: Name; Pin14_Name: Name; Pin13_Name: Name; Pin12_Name: Name; Pin11_Name: Name; Pin10_Name: Name; Pin9_Name: Name; Pin8_Name: Name; Pin7_Name: Name; Pin6_Name: Name; Pin5_Name: Name; Pin4_Name: Name; Pin3_Name: Name; Pin2_Name: Name; Pin1_Name: Name
pins: 1 Name, 2 Name, 3 Name, 4 Name, 5 Name, 6 Name, 7 Name, 8 Name, 9 Name, 10 Name, 11 Name, 12 Name, 13 Name, 14 Name, 15 Name, 16 Name, 17 Name, 18 Name, 19 Name, 20 Name, 21 Name, 22 Name, 23 Name, 24 Name, 25 Name, 26 Name, 27 Name

## XS_28
designator J?  (value not drawn)
Generic 28-contact connector; editable signal names; Pin28_Name: Name; Value: *; Pin27_Name: Name; Pin26_Name: Name; Pin25_Name: Name; Pin24_Name: Name; Pin23_Name: Name; Pin22_Name: Name; Pin21_Name: Name; Pin20_Name: Name; Pin19_Name: Name; Pin18_Name: Name; Pin17_Name: Name; Pin16_Name: Name; Pin15_Name: Name; Pin14_Name: Name; Pin13_Name: Name; Pin12_Name: Name; Pin11_Name: Name; Pin10_Name: Name; Pin9_Name: Name; Pin8_Name: Name; Pin7_Name: Name; Pin6_Name: Name; Pin5_Name: Name; Pin4_Name: Name; Pin3_Name: Name; Pin2_Name: Name; Pin1_Name: Name
pins: 1 Name, 2 Name, 3 Name, 4 Name, 5 Name, 6 Name, 7 Name, 8 Name, 9 Name, 10 Name, 11 Name, 12 Name, 13 Name, 14 Name, 15 Name, 16 Name, 17 Name, 18 Name, 19 Name, 20 Name, 21 Name, 22 Name, 23 Name, 24 Name, 25 Name, 26 Name, 27 Name, 28 Name

## XS_29
designator J?  (value not drawn)
Generic 29-contact connector; editable signal names; Pin29_Name: Name; Value: *; Pin28_Name: Name; Pin27_Name: Name; Pin26_Name: Name; Pin25_Name: Name; Pin24_Name: Name; Pin23_Name: Name; Pin22_Name: Name; Pin21_Name: Name; Pin20_Name: Name; Pin19_Name: Name; Pin18_Name: Name; Pin17_Name: Name; Pin16_Name: Name; Pin15_Name: Name; Pin14_Name: Name; Pin13_Name: Name; Pin12_Name: Name; Pin11_Name: Name; Pin10_Name: Name; Pin9_Name: Name; Pin8_Name: Name; Pin7_Name: Name; Pin6_Name: Name; Pin5_Name: Name; Pin4_Name: Name; Pin3_Name: Name; Pin2_Name: Name; Pin1_Name: Name
pins: 1 Name, 2 Name, 3 Name, 4 Name, 5 Name, 6 Name, 7 Name, 8 Name, 9 Name, 10 Name, 11 Name, 12 Name, 13 Name, 14 Name, 15 Name, 16 Name, 17 Name, 18 Name, 19 Name, 20 Name, 21 Name, 22 Name, 23 Name, 24 Name, 25 Name, 26 Name, 27 Name, 28 Name, 29 Name

## XS_30
designator J?  (value not drawn)
Generic 30-contact connector; editable signal names; Pin30_Name: Name; Value: *; Pin29_Name: Name; Pin28_Name: Name; Pin27_Name: Name; Pin26_Name: Name; Pin25_Name: Name; Pin24_Name: Name; Pin23_Name: Name; Pin22_Name: Name; Pin21_Name: Name; Pin20_Name: Name; Pin19_Name: Name; Pin18_Name: Name; Pin17_Name: Name; Pin16_Name: Name; Pin15_Name: Name; Pin14_Name: Name; Pin13_Name: Name; Pin12_Name: Name; Pin11_Name: Name; Pin10_Name: Name; Pin9_Name: Name; Pin8_Name: Name; Pin7_Name: Name; Pin6_Name: Name; Pin5_Name: Name; Pin4_Name: Name; Pin3_Name: Name; Pin2_Name: Name; Pin1_Name: Name
pins: 1 Name, 2 Name, 3 Name, 4 Name, 5 Name, 6 Name, 7 Name, 8 Name, 9 Name, 10 Name, 11 Name, 12 Name, 13 Name, 14 Name, 15 Name, 16 Name, 17 Name, 18 Name, 19 Name, 20 Name, 21 Name, 22 Name, 23 Name, 24 Name, 25 Name, 26 Name, 27 Name, 28 Name, 29 Name, 30 Name

## XS_31
designator J?  (value not drawn)
Generic 31-contact connector; editable signal names; Pin31_Name: Name; Value: *; Pin30_Name: Name; Pin29_Name: Name; Pin28_Name: Name; Pin27_Name: Name; Pin26_Name: Name; Pin25_Name: Name; Pin24_Name: Name; Pin23_Name: Name; Pin22_Name: Name; Pin21_Name: Name; Pin20_Name: Name; Pin19_Name: Name; Pin18_Name: Name; Pin17_Name: Name; Pin16_Name: Name; Pin15_Name: Name; Pin14_Name: Name; Pin13_Name: Name; Pin12_Name: Name; Pin11_Name: Name; Pin10_Name: Name; Pin9_Name: Name; Pin8_Name: Name; Pin7_Name: Name; Pin6_Name: Name; Pin5_Name: Name; Pin4_Name: Name; Pin3_Name: Name; Pin2_Name: Name; Pin1_Name: Name
pins: 1 Name, 2 Name, 3 Name, 4 Name, 5 Name, 6 Name, 7 Name, 8 Name, 9 Name, 10 Name, 11 Name, 12 Name, 13 Name, 14 Name, 15 Name, 16 Name, 17 Name, 18 Name, 19 Name, 20 Name, 21 Name, 22 Name, 23 Name, 24 Name, 25 Name, 26 Name, 27 Name, 28 Name, 29 Name, 30 Name, 31 Name

## XS_32
designator J?  (value not drawn)
Generic 32-contact connector; editable signal names; Pin32_Name: Name; Value: *; Pin31_Name: Name; Pin30_Name: Name; Pin29_Name: Name; Pin28_Name: Name; Pin27_Name: Name; Pin26_Name: Name; Pin25_Name: Name; Pin24_Name: Name; Pin23_Name: Name; Pin22_Name: Name; Pin21_Name: Name; Pin20_Name: Name; Pin19_Name: Name; Pin18_Name: Name; Pin17_Name: Name; Pin16_Name: Name; Pin15_Name: Name; Pin14_Name: Name; Pin13_Name: Name; Pin12_Name: Name; Pin11_Name: Name; Pin10_Name: Name; Pin9_Name: Name; Pin8_Name: Name; Pin7_Name: Name; Pin6_Name: Name; Pin5_Name: Name; Pin4_Name: Name; Pin3_Name: Name; Pin2_Name: Name; Pin1_Name: Name
pins: 1 Name, 2 Name, 3 Name, 4 Name, 5 Name, 6 Name, 7 Name, 8 Name, 9 Name, 10 Name, 11 Name, 12 Name, 13 Name, 14 Name, 15 Name, 16 Name, 17 Name, 18 Name, 19 Name, 20 Name, 21 Name, 22 Name, 23 Name, 24 Name, 25 Name, 26 Name, 27 Name, 28 Name, 29 Name, 30 Name, 31 Name, 32 Name

## XS_33
designator J?  (value not drawn)
Generic 33-contact connector; editable signal names; Pin33_Name: Name; Value: *; Pin32_Name: Name; Pin31_Name: Name; Pin30_Name: Name; Pin29_Name: Name; Pin28_Name: Name; Pin27_Name: Name; Pin26_Name: Name; Pin25_Name: Name; Pin24_Name: Name; Pin23_Name: Name; Pin22_Name: Name; Pin21_Name: Name; Pin20_Name: Name; Pin19_Name: Name; Pin18_Name: Name; Pin17_Name: Name; Pin16_Name: Name; Pin15_Name: Name; Pin14_Name: Name; Pin13_Name: Name; Pin12_Name: Name; Pin11_Name: Name; Pin10_Name: Name; Pin9_Name: Name; Pin8_Name: Name; Pin7_Name: Name; Pin6_Name: Name; Pin5_Name: Name; Pin4_Name: Name; Pin3_Name: Name; Pin2_Name: Name; Pin1_Name: Name
pins: 1 Name, 2 Name, 3 Name, 4 Name, 5 Name, 6 Name, 7 Name, 8 Name, 9 Name, 10 Name, 11 Name, 12 Name, 13 Name, 14 Name, 15 Name, 16 Name, 17 Name, 18 Name, 19 Name, 20 Name, 21 Name, 22 Name, 23 Name, 24 Name, 25 Name, 26 Name, 27 Name, 28 Name, 29 Name, 30 Name, 31 Name, 32 Name, 33 Name

## XS_34
designator J?  (value not drawn)
Generic 34-contact connector; editable signal names; Pin34_Name: Name; Value: *; Pin33_Name: Name; Pin32_Name: Name; Pin31_Name: Name; Pin30_Name: Name; Pin29_Name: Name; Pin28_Name: Name; Pin27_Name: Name; Pin26_Name: Name; Pin25_Name: Name; Pin24_Name: Name; Pin23_Name: Name; Pin22_Name: Name; Pin21_Name: Name; Pin20_Name: Name; Pin19_Name: Name; Pin18_Name: Name; Pin17_Name: Name; Pin16_Name: Name; Pin15_Name: Name; Pin14_Name: Name; Pin13_Name: Name; Pin12_Name: Name; Pin11_Name: Name; Pin10_Name: Name; Pin9_Name: Name; Pin8_Name: Name; Pin7_Name: Name; Pin6_Name: Name; Pin5_Name: Name; Pin4_Name: Name; Pin3_Name: Name; Pin2_Name: Name; Pin1_Name: Name
pins: 1 Name, 2 Name, 3 Name, 4 Name, 5 Name, 6 Name, 7 Name, 8 Name, 9 Name, 10 Name, 11 Name, 12 Name, 13 Name, 14 Name, 15 Name, 16 Name, 17 Name, 18 Name, 19 Name, 20 Name, 21 Name, 22 Name, 23 Name, 24 Name, 25 Name, 26 Name, 27 Name, 28 Name, 29 Name, 30 Name, 31 Name, 32 Name, 33 Name, 34 Name

## XS_35
designator J?  (value not drawn)
Generic 35-contact connector; editable signal names; Pin35_Name: Name; Value: *; Pin34_Name: Name; Pin33_Name: Name; Pin32_Name: Name; Pin31_Name: Name; Pin30_Name: Name; Pin29_Name: Name; Pin28_Name: Name; Pin27_Name: Name; Pin26_Name: Name; Pin25_Name: Name; Pin24_Name: Name; Pin23_Name: Name; Pin22_Name: Name; Pin21_Name: Name; Pin20_Name: Name; Pin19_Name: Name; Pin18_Name: Name; Pin17_Name: Name; Pin16_Name: Name; Pin15_Name: Name; Pin14_Name: Name; Pin13_Name: Name; Pin12_Name: Name; Pin11_Name: Name; Pin10_Name: Name; Pin9_Name: Name; Pin8_Name: Name; Pin7_Name: Name; Pin6_Name: Name; Pin5_Name: Name; Pin4_Name: Name; Pin3_Name: Name; Pin2_Name: Name; Pin1_Name: Name
pins: 1 Name, 2 Name, 3 Name, 4 Name, 5 Name, 6 Name, 7 Name, 8 Name, 9 Name, 10 Name, 11 Name, 12 Name, 13 Name, 14 Name, 15 Name, 16 Name, 17 Name, 18 Name, 19 Name, 20 Name, 21 Name, 22 Name, 23 Name, 24 Name, 25 Name, 26 Name, 27 Name, 28 Name, 29 Name, 30 Name, 31 Name, 32 Name, 33 Name, 34 Name, 35 Name

## XS_36
designator J?  (value not drawn)
Generic 36-contact connector; editable signal names; Pin36_Name: Name; Value: *; Pin35_Name: Name; Pin34_Name: Name; Pin33_Name: Name; Pin32_Name: Name; Pin31_Name: Name; Pin30_Name: Name; Pin29_Name: Name; Pin28_Name: Name; Pin27_Name: Name; Pin26_Name: Name; Pin25_Name: Name; Pin24_Name: Name; Pin23_Name: Name; Pin22_Name: Name; Pin21_Name: Name; Pin20_Name: Name; Pin19_Name: Name; Pin18_Name: Name; Pin17_Name: Name; Pin16_Name: Name; Pin15_Name: Name; Pin14_Name: Name; Pin13_Name: Name; Pin12_Name: Name; Pin11_Name: Name; Pin10_Name: Name; Pin9_Name: Name; Pin8_Name: Name; Pin7_Name: Name; Pin6_Name: Name; Pin5_Name: Name; Pin4_Name: Name; Pin3_Name: Name; Pin2_Name: Name; Pin1_Name: Name
pins: 1 Name, 2 Name, 3 Name, 4 Name, 5 Name, 6 Name, 7 Name, 8 Name, 9 Name, 10 Name, 11 Name, 12 Name, 13 Name, 14 Name, 15 Name, 16 Name, 17 Name, 18 Name, 19 Name, 20 Name, 21 Name, 22 Name, 23 Name, 24 Name, 25 Name, 26 Name, 27 Name, 28 Name, 29 Name, 30 Name, 31 Name, 32 Name, 33 Name, 34 Name, 35 Name, 36 Name

## XS_37
designator J?  (value not drawn)
Generic 37-contact connector; editable signal names; Pin37_Name: Name; Value: *; Pin36_Name: Name; Pin35_Name: Name; Pin34_Name: Name; Pin33_Name: Name; Pin32_Name: Name; Pin31_Name: Name; Pin30_Name: Name; Pin29_Name: Name; Pin28_Name: Name; Pin27_Name: Name; Pin26_Name: Name; Pin25_Name: Name; Pin24_Name: Name; Pin23_Name: Name; Pin22_Name: Name; Pin21_Name: Name; Pin20_Name: Name; Pin19_Name: Name; Pin18_Name: Name; Pin17_Name: Name; Pin16_Name: Name; Pin15_Name: Name; Pin14_Name: Name; Pin13_Name: Name; Pin12_Name: Name; Pin11_Name: Name; Pin10_Name: Name; Pin9_Name: Name; Pin8_Name: Name; Pin7_Name: Name; Pin6_Name: Name; Pin5_Name: Name; Pin4_Name: Name; Pin3_Name: Name; Pin2_Name: Name; Pin1_Name: Name
pins: 1 Name, 2 Name, 3 Name, 4 Name, 5 Name, 6 Name, 7 Name, 8 Name, 9 Name, 10 Name, 11 Name, 12 Name, 13 Name, 14 Name, 15 Name, 16 Name, 17 Name, 18 Name, 19 Name, 20 Name, 21 Name, 22 Name, 23 Name, 24 Name, 25 Name, 26 Name, 27 Name, 28 Name, 29 Name, 30 Name, 31 Name, 32 Name, 33 Name, 34 Name, 35 Name, 36 Name, 37 Name

## XS_38
designator J?  (value not drawn)
Generic 38-contact connector; editable signal names; Pin38_Name: Name; Value: *; Pin37_Name: Name; Pin36_Name: Name; Pin35_Name: Name; Pin34_Name: Name; Pin33_Name: Name; Pin32_Name: Name; Pin31_Name: Name; Pin30_Name: Name; Pin29_Name: Name; Pin28_Name: Name; Pin27_Name: Name; Pin26_Name: Name; Pin25_Name: Name; Pin24_Name: Name; Pin23_Name: Name; Pin22_Name: Name; Pin21_Name: Name; Pin20_Name: Name; Pin19_Name: Name; Pin18_Name: Name; Pin17_Name: Name; Pin16_Name: Name; Pin15_Name: Name; Pin14_Name: Name; Pin13_Name: Name; Pin12_Name: Name; Pin11_Name: Name; Pin10_Name: Name; Pin9_Name: Name; Pin8_Name: Name; Pin7_Name: Name; Pin6_Name: Name; Pin5_Name: Name; Pin4_Name: Name; Pin3_Name: Name; Pin2_Name: Name; Pin1_Name: Name
pins: 1 Name, 2 Name, 3 Name, 4 Name, 5 Name, 6 Name, 7 Name, 8 Name, 9 Name, 10 Name, 11 Name, 12 Name, 13 Name, 14 Name, 15 Name, 16 Name, 17 Name, 18 Name, 19 Name, 20 Name, 21 Name, 22 Name, 23 Name, 24 Name, 25 Name, 26 Name, 27 Name, 28 Name, 29 Name, 30 Name, 31 Name, 32 Name, 33 Name, 34 Name, 35 Name, 36 Name, 37 Name, 38 Name

## XS_39
designator J?  (value not drawn)
Generic 39-contact connector; editable signal names; Pin39_Name: Name; Value: *; Pin38_Name: Name; Pin37_Name: Name; Pin36_Name: Name; Pin35_Name: Name; Pin34_Name: Name; Pin33_Name: Name; Pin32_Name: Name; Pin31_Name: Name; Pin30_Name: Name; Pin29_Name: Name; Pin28_Name: Name; Pin27_Name: Name; Pin26_Name: Name; Pin25_Name: Name; Pin24_Name: Name; Pin23_Name: Name; Pin22_Name: Name; Pin21_Name: Name; Pin20_Name: Name; Pin19_Name: Name; Pin18_Name: Name; Pin17_Name: Name; Pin16_Name: Name; Pin15_Name: Name; Pin14_Name: Name; Pin13_Name: Name; Pin12_Name: Name; Pin11_Name: Name; Pin10_Name: Name; Pin9_Name: Name; Pin8_Name: Name; Pin7_Name: Name; Pin6_Name: Name; Pin5_Name: Name; Pin4_Name: Name; Pin3_Name: Name; Pin2_Name: Name; Pin1_Name: Name
pins: 1 Name, 2 Name, 3 Name, 4 Name, 5 Name, 6 Name, 7 Name, 8 Name, 9 Name, 10 Name, 11 Name, 12 Name, 13 Name, 14 Name, 15 Name, 16 Name, 17 Name, 18 Name, 19 Name, 20 Name, 21 Name, 22 Name, 23 Name, 24 Name, 25 Name, 26 Name, 27 Name, 28 Name, 29 Name, 30 Name, 31 Name, 32 Name, 33 Name, 34 Name, 35 Name, 36 Name, 37 Name, 38 Name, 39 Name

## XS_40
designator J?  (value not drawn)
Generic 40-contact connector; editable signal names; Pin40_Name: Name; Value: *; Pin39_Name: Name; Pin38_Name: Name; Pin37_Name: Name; Pin36_Name: Name; Pin35_Name: Name; Pin34_Name: Name; Pin33_Name: Name; Pin32_Name: Name; Pin31_Name: Name; Pin30_Name: Name; Pin29_Name: Name; Pin28_Name: Name; Pin27_Name: Name; Pin26_Name: Name; Pin25_Name: Name; Pin24_Name: Name; Pin23_Name: Name; Pin22_Name: Name; Pin21_Name: Name; Pin20_Name: Name; Pin19_Name: Name; Pin18_Name: Name; Pin17_Name: Name; Pin16_Name: Name; Pin15_Name: Name; Pin14_Name: Name; Pin13_Name: Name; Pin12_Name: Name; Pin11_Name: Name; Pin10_Name: Name; Pin9_Name: Name; Pin8_Name: Name; Pin7_Name: Name; Pin6_Name: Name; Pin5_Name: Name; Pin4_Name: Name; Pin3_Name: Name; Pin2_Name: Name; Pin1_Name: Name
pins: 1 Name, 2 Name, 3 Name, 4 Name, 5 Name, 6 Name, 7 Name, 8 Name, 9 Name, 10 Name, 11 Name, 12 Name, 13 Name, 14 Name, 15 Name, 16 Name, 17 Name, 18 Name, 19 Name, 20 Name, 21 Name, 22 Name, 23 Name, 24 Name, 25 Name, 26 Name, 27 Name, 28 Name, 29 Name, 30 Name, 31 Name, 32 Name, 33 Name, 34 Name, 35 Name, 36 Name, 37 Name, 38 Name, 39 Name, 40 Name

## XS_42
designator J?  (value not drawn)
Generic 42-contact connector; editable signal names; Pin42_Name: Name; Value: *; Pin41_Name: Name; Pin40_Name: Name; Pin39_Name: Name; Pin38_Name: Name; Pin37_Name: Name; Pin36_Name: Name; Pin35_Name: Name; Pin34_Name: Name; Pin33_Name: Name; Pin32_Name: Name; Pin31_Name: Name; Pin30_Name: Name; Pin29_Name: Name; Pin28_Name: Name; Pin27_Name: Name; Pin26_Name: Name; Pin25_Name: Name; Pin24_Name: Name; Pin23_Name: Name; Pin22_Name: Name; Pin21_Name: Name; Pin20_Name: Name; Pin19_Name: Name; Pin18_Name: Name; Pin17_Name: Name; Pin16_Name: Name; Pin15_Name: Name; Pin14_Name: Name; Pin13_Name: Name; Pin12_Name: Name; Pin11_Name: Name; Pin10_Name: Name; Pin9_Name: Name; Pin8_Name: Name; Pin7_Name: Name; Pin6_Name: Name; Pin5_Name: Name; Pin4_Name: Name; Pin3_Name: Name; Pin2_Name: Name; Pin1_Name: Name
pins: 1 Name, 2 Name, 3 Name, 4 Name, 5 Name, 6 Name, 7 Name, 8 Name, 9 Name, 10 Name, 11 Name, 12 Name, 13 Name, 14 Name, 15 Name, 16 Name, 17 Name, 18 Name, 19 Name, 20 Name, 21 Name, 22 Name, 23 Name, 24 Name, 25 Name, 26 Name, 27 Name, 28 Name, 29 Name, 30 Name, 31 Name, 32 Name, 33 Name, 34 Name, 35 Name, 36 Name, 37 Name, 38 Name, 39 Name, 40 Name, 41 Name, 42 Name

## XS_44
designator J?  (value not drawn)
Generic 44-contact connector; editable signal names; Pin44_Name: Name; Value: *; Pin43_Name: Name; Pin42_Name: Name; Pin41_Name: Name; Pin40_Name: Name; Pin39_Name: Name; Pin38_Name: Name; Pin37_Name: Name; Pin36_Name: Name; Pin35_Name: Name; Pin34_Name: Name; Pin33_Name: Name; Pin32_Name: Name; Pin31_Name: Name; Pin30_Name: Name; Pin29_Name: Name; Pin28_Name: Name; Pin27_Name: Name; Pin26_Name: Name; Pin25_Name: Name; Pin24_Name: Name; Pin23_Name: Name; Pin22_Name: Name; Pin21_Name: Name; Pin20_Name: Name; Pin19_Name: Name; Pin18_Name: Name; Pin17_Name: Name; Pin16_Name: Name; Pin15_Name: Name; Pin14_Name: Name; Pin13_Name: Name; Pin12_Name: Name; Pin11_Name: Name; Pin10_Name: Name; Pin9_Name: Name; Pin8_Name: Name; Pin7_Name: Name; Pin6_Name: Name; Pin5_Name: Name; Pin4_Name: Name; Pin3_Name: Name; Pin2_Name: Name; Pin1_Name: Name
pins: 1 Name, 2 Name, 3 Name, 4 Name, 5 Name, 6 Name, 7 Name, 8 Name, 9 Name, 10 Name, 11 Name, 12 Name, 13 Name, 14 Name, 15 Name, 16 Name, 17 Name, 18 Name, 19 Name, 20 Name, 21 Name, 22 Name, 23 Name, 24 Name, 25 Name, 26 Name, 27 Name, 28 Name, 29 Name, 30 Name, 31 Name, 32 Name, 33 Name, 34 Name, 35 Name, 36 Name, 37 Name, 38 Name, 39 Name, 40 Name, 41 Name, 42 Name, 43 Name, 44 Name

## XS_46
designator J?  (value not drawn)
Generic 46-contact connector; editable signal names; Pin46_Name: Name; Value: *; Pin45_Name: Name; Pin44_Name: Name; Pin43_Name: Name; Pin42_Name: Name; Pin41_Name: Name; Pin40_Name: Name; Pin39_Name: Name; Pin38_Name: Name; Pin37_Name: Name; Pin36_Name: Name; Pin35_Name: Name; Pin34_Name: Name; Pin33_Name: Name; Pin32_Name: Name; Pin31_Name: Name; Pin30_Name: Name; Pin29_Name: Name; Pin28_Name: Name; Pin27_Name: Name; Pin26_Name: Name; Pin25_Name: Name; Pin24_Name: Name; Pin23_Name: Name; Pin22_Name: Name; Pin21_Name: Name; Pin20_Name: Name; Pin19_Name: Name; Pin18_Name: Name; Pin17_Name: Name; Pin16_Name: Name; Pin15_Name: Name; Pin14_Name: Name; Pin13_Name: Name; Pin12_Name: Name; Pin11_Name: Name; Pin10_Name: Name; Pin9_Name: Name; Pin8_Name: Name; Pin7_Name: Name; Pin6_Name: Name; Pin5_Name: Name; Pin4_Name: Name; Pin3_Name: Name; Pin2_Name: Name; Pin1_Name: Name
pins: 1 Name, 2 Name, 3 Name, 4 Name, 5 Name, 6 Name, 7 Name, 8 Name, 9 Name, 10 Name, 11 Name, 12 Name, 13 Name, 14 Name, 15 Name, 16 Name, 17 Name, 18 Name, 19 Name, 20 Name, 21 Name, 22 Name, 23 Name, 24 Name, 25 Name, 26 Name, 27 Name, 28 Name, 29 Name, 30 Name, 31 Name, 32 Name, 33 Name, 34 Name, 35 Name, 36 Name, 37 Name, 38 Name, 39 Name, 40 Name, 41 Name, 42 Name, 43 Name, 44 Name, 45 Name, 46 Name

## XS_48
designator J?  (value not drawn)
Generic 48-contact connector; editable signal names; Pin48_Name: Name; Value: *; Pin47_Name: Name; Pin46_Name: Name; Pin45_Name: Name; Pin44_Name: Name; Pin43_Name: Name; Pin42_Name: Name; Pin41_Name: Name; Pin40_Name: Name; Pin39_Name: Name; Pin38_Name: Name; Pin37_Name: Name; Pin36_Name: Name; Pin35_Name: Name; Pin34_Name: Name; Pin33_Name: Name; Pin32_Name: Name; Pin31_Name: Name; Pin30_Name: Name; Pin29_Name: Name; Pin28_Name: Name; Pin27_Name: Name; Pin26_Name: Name; Pin25_Name: Name; Pin24_Name: Name; Pin23_Name: Name; Pin22_Name: Name; Pin21_Name: Name; Pin20_Name: Name; Pin19_Name: Name; Pin18_Name: Name; Pin17_Name: Name; Pin16_Name: Name; Pin15_Name: Name; Pin14_Name: Name; Pin13_Name: Name; Pin12_Name: Name; Pin11_Name: Name; Pin10_Name: Name; Pin9_Name: Name; Pin8_Name: Name; Pin7_Name: Name; Pin6_Name: Name; Pin5_Name: Name; Pin4_Name: Name; Pin3_Name: Name; Pin2_Name: Name; Pin1_Name: Name
pins: 1 Name, 2 Name, 3 Name, 4 Name, 5 Name, 6 Name, 7 Name, 8 Name, 9 Name, 10 Name, 11 Name, 12 Name, 13 Name, 14 Name, 15 Name, 16 Name, 17 Name, 18 Name, 19 Name, 20 Name, 21 Name, 22 Name, 23 Name, 24 Name, 25 Name, 26 Name, 27 Name, 28 Name, 29 Name, 30 Name, 31 Name, 32 Name, 33 Name, 34 Name, 35 Name, 36 Name, 37 Name, 38 Name, 39 Name, 40 Name, 41 Name, 42 Name, 43 Name, 44 Name, 45 Name, 46 Name, 47 Name, 48 Name